# Altium schematic symbol library LED0.SchLib: 1 symbol
Pins are listed as number, name and electrical type; pins without a type are passive.

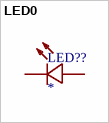
[diagram p0: symbol LED0]

## LED0
designator LED??
footprint LED1206-R-RD
pins: 1 A, 2 K